# Altium footprint library Footprints.PcbLib: 320 footprints (part 8 of 20)
Each footprint in its own frame and in the unit in brackets; x right, y up, seen from the top. Pads: shape width x height; smd on the part's side, far side on the other; paste and mask are expansions set on the pad; w line width, h text height; cw(c..) or ccw(c..) is an arc to the next point about the centre after c.
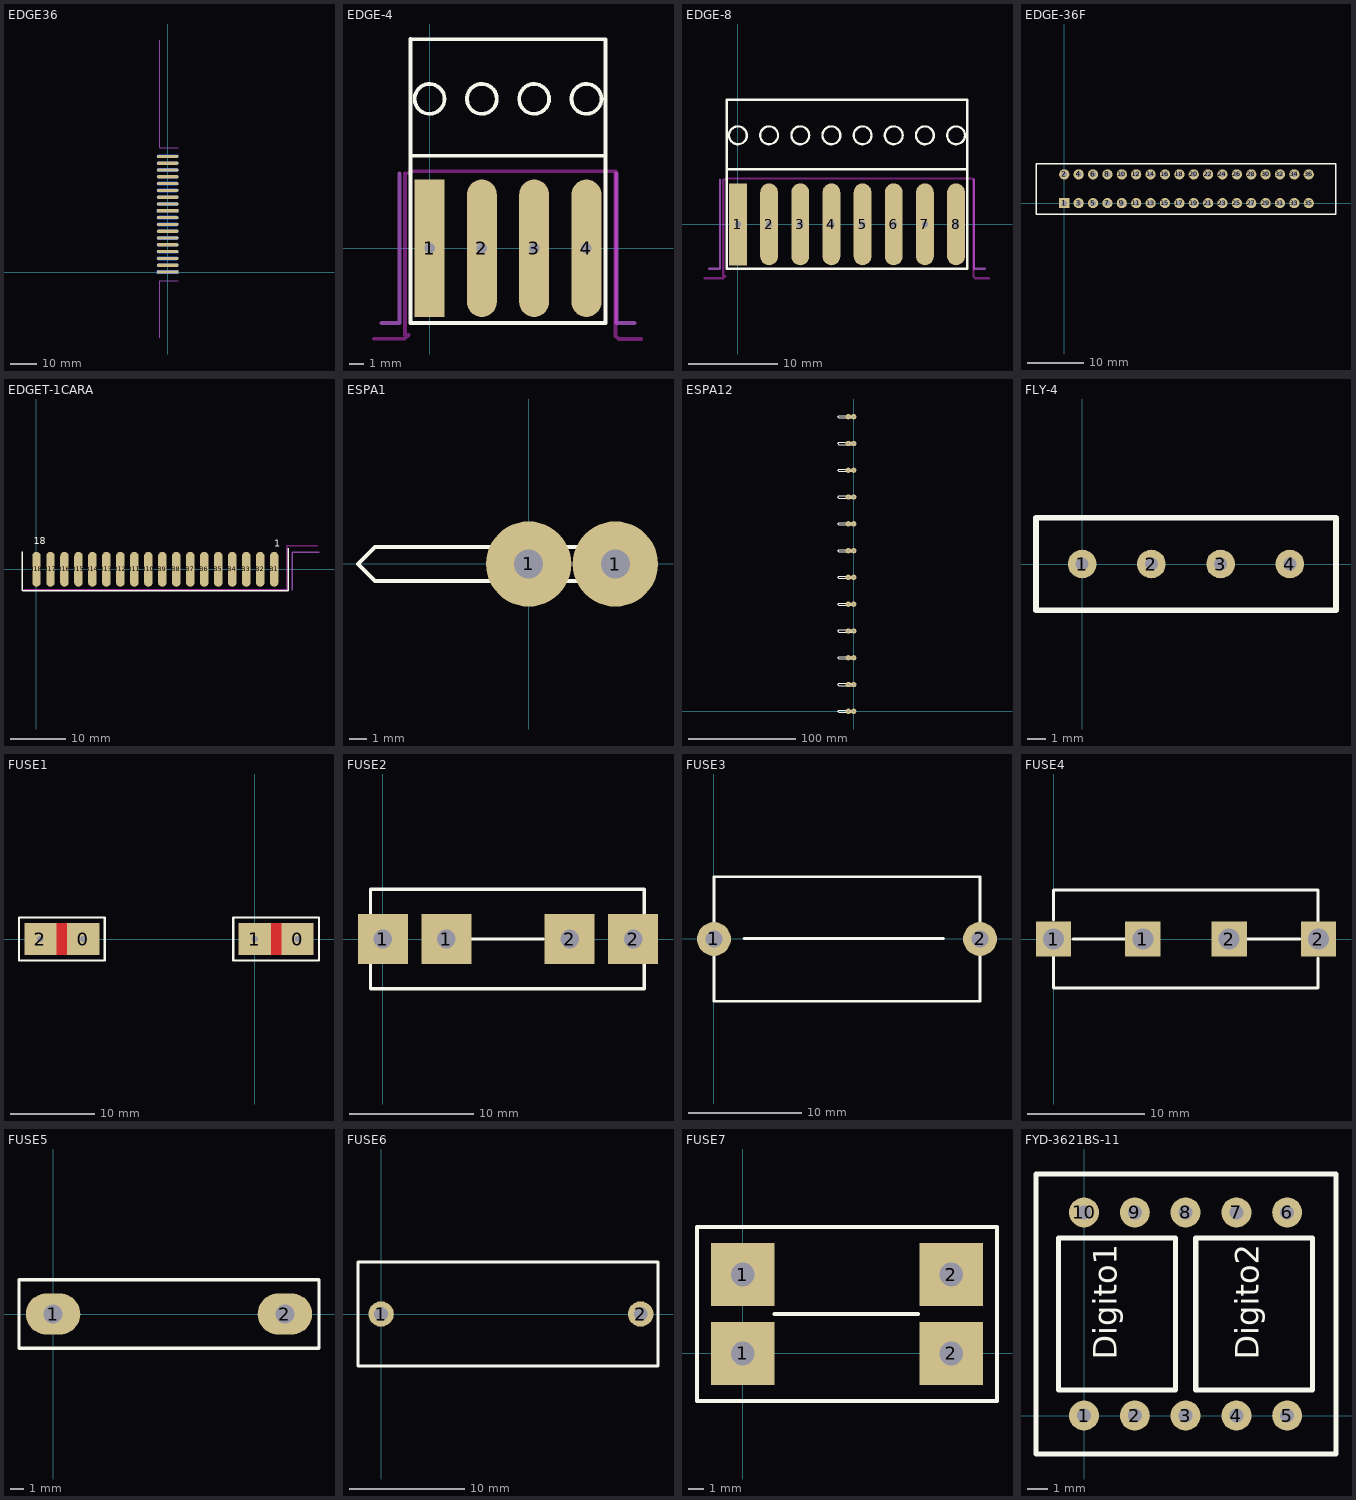
[diagram p7: the footprints below, top view; thin cyan lines are the x and y axes]

## EDGE36 [mm]
pads (36):
  rect 8x1.2 smd: A1(0,0) A10(0,22.86)
  oval 8x1.2 smd: A2(0,2.54) A3(0,5.08) A4(0,7.62) A5(0,10.16) A6(0,12.7) A7(0,15.24) A8(0,17.78) A9(0,20.32) A11(0,25.4) A12(0,27.94) A13(0,30.48) A14(0,33.02) A15(0,35.56) A16(0,38.1) A17(0,40.64) A18(0,43.18)
  rect 8x1.2 smd far side: B1(0,0) B10(0,22.86)
  oval 8x1.2 smd far side: B2(0,2.54) B3(0,5.08) B4(0,7.62) B5(0,10.16) B6(0,12.7) B7(0,15.24) B8(0,17.78) B9(0,20.32) B11(0,25.4) B12(0,27.94) B13(0,30.48) B14(0,33.02) B15(0,35.56) B16(0,38.1) B17(0,40.64) B18(0,43.18)
Top Solder:
  region: 5,-25 5,87 -4,87 -4,-25
Bottom Solder:
  region: 5,-25 5,87 -4,87 -4,-25
Mechanical 1:
  lines w0.254: -3,-24.5 -3,-3.29 4,-3.29 ; -3,86.5 -3,46.47 4,46.47

## EDGE-4 [mm]
pads (4):
  rect 2x9.2 hole 0.7: 1(0,0)
  oval 2x9.2 hole 0.7: 2(3.5,0) 3(7,0) 4(10.5,0)
Top Overlay:
  circle w0.254: c10.5,10 r1
  circle w0.254: c7,10 r1
  circle w0.254: c10.5,10 r1
  circle w0.254: c7,10 r1
  circle w0.254: c3.5,10 r1
  circle w0.254: c0,10 r1
  lines w0.254: -1.27,6.2 11.77,6.2 11.77,-5 -1.27,-5 -1.27,0.01 -1.27,6.21 -1.27,14.01 ; -1.27,14 11.77,14 11.77,6.15
Top Solder:
  rectangle: 12,-6 14.35,-5
  rectangle: -4,-6 -1,-4.72
  rectangle: -4,-5 14.35,5
Bottom Solder:
  rectangle: 12,-6 14.35,-4.53
  rectangle: -4,-6 -1,-4.48
  rectangle: -4,-5 14.35,5
Keep-Out Layer:
  lines w0.254: -3.73,-6.05 -1.66,-6.05 -1.41,-5.8 ; -1.64,-5.8 -1.64,5.03 ; -1.41,5.03 -1.28,5.16 -1.18,5.16 ; -1.27,5.16 12.44,5.16 ; 12.33,5.16 12.45,5.04 12.45,-5.86 12.66,-6.07 14.16,-6.07
Mechanical 1:
  lines w0.254: -3.22,-5 -2.02,-5 -2.02,5 ; 12.52,5 12.52,-5 13.72,-5

## EDGE-8 [mm]
pads (8):
  rect 2x9.2 hole 0.7: 1(0,0)
  oval 2x9.2 hole 0.7: 2(3.5,0) 3(7,0) 4(10.5,0) 5(14,0) 6(17.5,0) 7(21,0) 8(24.5,0)
Top Overlay:
  circle w0.254: c0,10 r1
  circle w0.254: c3.5,10 r1
  circle w0.254: c7,10 r1
  circle w0.254: c10.5,10 r1
  circle w0.254: c14,10 r1
  circle w0.254: c17.5,10 r1
  circle w0.254: c21,10 r1
  circle w0.254: c24.5,10 r1
  lines w0.254: -1.27,6.2 25.77,6.2 25.77,-5 -1.27,-5 -1.27,0.01 -1.27,6.21 -1.27,14.01 ; -1.27,14 25.77,14 25.77,6.15
Top Solder:
  rectangle: -4,-5 28.35,5
  rectangle: -4,-6 -1,-4.72
  rectangle: 26,-6 28.35,-5
Bottom Solder:
  rectangle: -4,-5 28.35,5
  rectangle: -4,-6 -1,-4.48
  rectangle: 26,-6 28.35,-4.53
Keep-Out Layer:
  lines w0.254: -3.73,-6.05 -1.66,-6.05 -1.41,-5.8 ; -1.64,-5.8 -1.64,5.03 ; -1.41,5.03 -1.28,5.16 -1.18,5.16 ; -1.27,5.16 26.33,5.16 26.45,5.04 26.45,-5.86 26.66,-6.07 28.16,-6.07
Mechanical 1:
  lines w0.254: -3.22,-5 -2.02,-5 -2.02,5 ; 26.52,5 26.52,-5 27.72,-5

## EDGE-36F [mm]
pads (36):
  rect 1.8x1.8 hole 1: 1(0,0)
  round 1.8 hole 1: 2(0,5.08) 3(2.54,0) 4(2.54,5.08) 5(5.08,0) 6(5.08,5.08) 7(7.62,0) 8(7.62,5.08) 9(10.16,0) 10(10.16,5.08) 11(12.7,0) 12(12.7,5.08) 13(15.24,0) 14(15.24,5.08) 15(17.78,0) 16(17.78,5.08) 17(20.32,0) 18(20.32,5.08) 19(22.86,0) 20(22.86,5.08) 21(25.4,0) 22(25.4,5.08) 23(27.94,0) 24(27.94,5.08) 25(30.48,0) 26(30.48,5.08) 27(33.02,0) 28(33.02,5.08) 29(35.56,0) 30(35.56,5.08) 31(38.1,0) 32(38.1,5.08) 33(40.64,0) 34(40.64,5.08) 35(43.18,0) 36(43.18,5.08)
Top Overlay:
  lines w0.254: -5,-2 48,-2 48,7 -5,7 -5,-2

## EDGET-1CARA [mil]
pads (18):
  oval 60x250 smd: B1(1700,0) B2(1600,0) B3(1500,0) B4(1400,0) B5(1300,0) B6(1200,0) B7(1100,0) B8(1000,0) B9(900,0) B10(800,0) B11(700,0) B12(600,0) B13(500,0) B14(400,0) B15(300,0) B16(200,0) B17(100,0) B18(0,0)
Top Overlay:
  lines w10: -101.1,123.86 -100.39,-152.01 ; -98.39,-154.02 -53.66,-154.02 ; -66.85,-154.02 1770.67,-154.02 1800.75,-154.02 1800.98,-154.25 1800.98,-123.98 1801.1,-123.86 1800.39,152.01
  text "1" at 1700,160 h50
  text "18" at -20,180 h50
Bottom Overlay:
  text "D1" at 1720,160 h50
  text "D18" at 100,180 h50
Top Solder:
  rectangle: -100.39,-154.33 1834.65,141.34
  lines w62.99: 1829.53,-150 1829.53,120.47 2020.47,120.47
Bottom Solder:
  rectangle: -100.39,-154.33 1834.65,141.34
  lines w62.99: 1829.53,-150 1829.53,120.47 2020.47,120.47
Keep-Out Layer:
  lines w10: -88.43,-146.69 1791.57,-146.69 ; 1790,-140 1790,170 1960,170 2010,170
Mechanical 1:
  lines w10: 1829.53,-150 1829.53,120.47 2020.47,120.47
Mechanical 4:
  lines w10: -100,-150 1800,-150

## ESPA1 [mm]
pads (2):
  round 5 hole 1.7: 1(0,0) 1(5.08,0)
Top Overlay:
  circle w0.254: c0,0 r1.005
  circle w0.254: c5.08,0 r1.02
  lines w0.254: -10,0 -9,-1 7,-1 7,1 -9,1 -10,0

## ESPA12 [mm]
pads (24):
  round 5 hole 1.7: 1(-5,0) 1(0,0) 2(-5.08,25) 2(0,25) 3(-5.08,50) 3(0,50) 4(-5.08,75) 4(0,75) 5(-5.08,100) 5(0,100) 6(-5.08,125) 6(0,125) 7(-5.08,150) 7(0,150) 8(-5.08,175) 8(0,175) 9(-5.08,200) 9(0,200) 10(-5.08,225) 10(0,225) 11(-5.08,250) 11(0,250) 12(-5.08,275) 12(0,275)
Top Overlay:
  drawing of 196 lines, arcs and shapes, not listed

## FLY-4 [mil]
pads (4):
  round 62 hole 28: 1(0,0) 2(150,0) 3(300,0) 4(450,0)
Top Overlay:
  lines w12: -100,-100 -100,100 550,100 550,-100 -100,-100

## FUSE1 [mil]
pads (4):
  rect 150x150 hole 30: 0(-800,0) 0(200,0) 1(0,0) 2(-1000,0)
Top Layer:
  rectangle: 50,-75 150,75
  rectangle: -950,-75 -850,75
Bottom Layer:
  rectangle: 50,-75 150,75
  rectangle: -950,-75 -850,75
Top Overlay:
  lines w10: -1100,-100 -1100,100 -700,100 -700,-100 -1100,-100 ; -100,-100 -100,100 300,100 300,-100 -100,-100

## FUSE2 [mm]
pads (4):
  rect 4x4 hole 1.5: 1(0,0) 1(5.1,0) 2(15,0) 2(20.1,0)
Top Overlay:
  lines w0.254: 7.1,0 12.9,0 ; -1,-4 -1,4 21,4 21,-4 -1,-4

## FUSE3 [mm]
pads (2):
  round 3 hole 1.5: 1(0,0) 2(23.5,0)
Top Overlay:
  lines w0.254: 2.66,0.03 20.28,0.03 ; 0,-5.5 23.5,-5.5 23.5,5.5 0,5.5 0,-5.5

## FUSE4 [mm]
pads (4):
  rect 3x3 hole 1.8: 1(0,0) 1(7.62,0) 2(15,0) 2(22.62,0)
Top Overlay:
  lines w0.254: 0,-1.5 0,-4.2 22.6,-4.2 22.6,-1.62 ; 0,1.61 0,4.2 22.6,4.2 22.6,1.5 ; 1.65,0 6.07,0 ; 16.56,0 21.03,0

## FUSE5 [mm]
pads (2):
  oval 4x3 hole 1.4: 1(0,0) 2(17,0)
Top Overlay:
  lines w0.254: -2.5,-2.5 -2.5,2.5 19.5,2.5 19.5,-2.5 -2.5,-2.5

## FUSE6 [mm]
pads (2):
  round 2.2 hole 1.2: 1(0,0) 2(22.5,0)
Top Overlay:
  lines w0.254: -2,-4.5 -2,4.5 24,4.5 24,-4.5 -2,-4.5

## FUSE7 [mm]
pads (4):
  rect 4x4 hole 1.5: 1(0,0) 1(0,5) 2(13.2,0) 2(13.2,5)
Top Overlay:
  lines w0.254: 2,2.5 11.1,2.5 ; -2.9,-3 -2.9,8 16.1,8 16.1,-3 -2.9,-3

## FYD-3621BS-11 [mm]
pads (10):
  round 1.5 hole 0.7: 1(0,0) 2(2.54,0) 3(5.08,0) 4(7.62,0) 5(10.16,0) 6(10.16,10.16) 7(7.62,10.16) 8(5.08,10.16) 9(2.54,10.16) 10(0,10.16)
Top Overlay:
  lines w0.254: -2.4,-1.92 12.6,-1.92 12.6,12.08 -2.4,12.08 -2.4,-1.92 ; -1.27,1.27 -1.27,8.89 4.572,8.89 4.572,1.27 -1.27,1.27 ; 5.588,1.27 5.588,8.89 11.43,8.89 11.43,1.27 5.588,1.27
  text "Digito1" at 2.032,2.794 h2
  text "Digito2" at 9.144,2.794 h2
3D body: height 0, standoff 0, extent -2.527,-2.047 12.727,12.207